# Altium footprint library LM51772RHAR.PcbLib: 3 footprints
Each footprint in its own frame and in the unit in brackets; x right, y up, seen from the top. Pads: shape width x height; smd on the part's side, far side on the other; paste and mask are expansions set on the pad; w line width, h text height; cw(c..) or ccw(c..) is an arc to the next point about the centre after c.
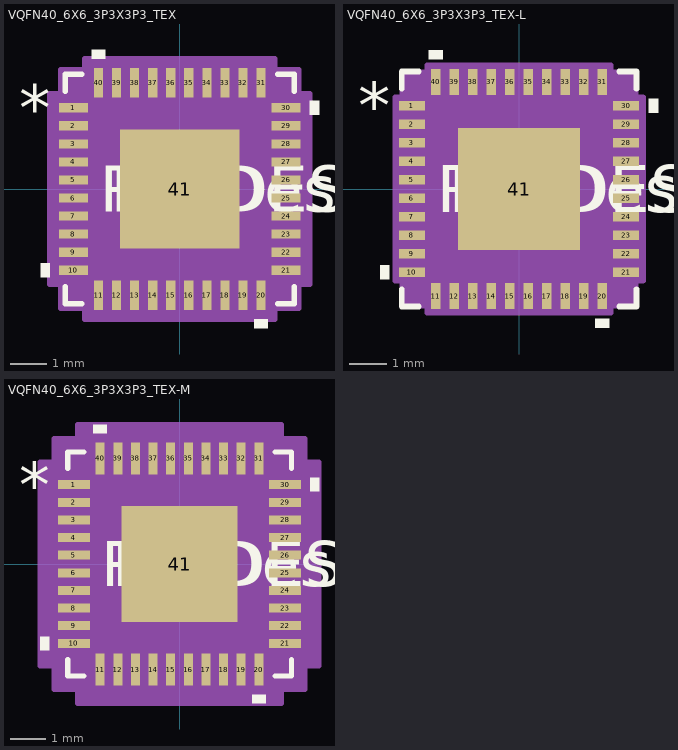
[diagram p0: the footprints below, top view; thin cyan lines are the x and y axes]

## VQFN40_6X6_3P3X3P3_TEX [mm]
pads (41):
  rect 0.808x0.255 smd paste+0 mask+0: 1(-2.944,2.25) 2(-2.944,1.75) 3(-2.944,1.25) 4(-2.944,0.75) 5(-2.944,0.25) 6(-2.944,-0.25) 7(-2.944,-0.75) 8(-2.944,-1.25) 9(-2.944,-1.75) 10(-2.944,-2.25) 21(2.944,-2.25) 22(2.944,-1.75) 23(2.944,-1.25) 24(2.944,-0.75) 25(2.944,-0.25) 26(2.944,0.25) 27(2.944,0.75) 28(2.944,1.25) 29(2.944,1.75) 30(2.944,2.25)
  rect 0.255x0.808 smd paste+0 mask+0: 11(-2.25,-2.944) 12(-1.75,-2.944) 13(-1.25,-2.944) 14(-0.75,-2.944) 15(-0.25,-2.944) 16(0.25,-2.944) 17(0.75,-2.944) 18(1.25,-2.944) 19(1.75,-2.944) 20(2.25,-2.944) 31(2.25,2.944) 32(1.75,2.944) 33(1.25,2.944) 34(0.75,2.944) 35(0.25,2.944) 36(-0.25,2.944) 37(-0.75,2.944) 38(-1.25,2.944) 39(-1.75,2.944) 40(-2.25,2.944)
  rect 3.302x3.302 smd paste+0 mask+0: 41(0,0)
Top Overlay:
  region: -3.602,-2.06 -3.856,-2.06 -3.856,-2.441 -3.602,-2.441
  region: 2.441,-3.602 2.06,-3.602 2.06,-3.856 2.441,-3.856
  region: 3.602,2.441 3.856,2.441 3.856,2.06 3.602,2.06
  region: -2.06,3.602 -2.441,3.602 -2.441,3.856 -2.06,3.856
  lines w0.152: -3.175,-2.71 -3.175,-3.175 -2.71,-3.175 ; -3.175,2.71 -3.175,3.175 -2.71,3.175 ; 2.71,-3.175 3.175,-3.175 3.175,-2.71 ; 2.71,3.175 3.175,3.175 3.175,2.71
  text "*" at -4.453,1.615 h1.27
  text "RefDes" at -1.905,-0.635 h1.27
  text "REFDES" at -2.222,-0.635 h1.27
Mechanical 13:
  drawing of 165 lines, arcs and shapes, not listed
  text "*" at -2.07,1.615 h1.27
  text "RefDes2" at -2.222,-0.635 h1.27
Mechanical 15:
  region: -2.631,-3.302 -3.302,-3.302 -3.302,-2.631 -3.602,-2.631 -3.602,2.631 -3.302,2.631 -3.302,3.302 -2.631,3.302 -2.631,3.602 2.631,3.602 2.631,3.302 3.302,3.302 3.302,2.631 3.602,2.631 3.602,-2.631 3.302,-2.631 3.302,-3.302 2.631,-3.302 2.631,-3.602 -2.631,-3.602
  lines w0.152: -3.602,-2.631 -3.302,-2.631 -3.302,-3.302 -2.631,-3.302 -2.631,-3.602 2.631,-3.602 2.631,-3.302 3.302,-3.302 3.302,-2.631 3.602,-2.631 3.602,2.631 3.302,2.631 3.302,3.302 2.631,3.302 2.631,3.602 -2.631,3.602 -2.631,3.302 -3.302,3.302 -3.302,2.631 -3.602,2.631 -3.602,-2.631
3D body "VQFN40_6X6_3P3X3P3_TEX.step": height 0.94, standoff 0, extent -3.048,-3.048 3.048,3.048

## VQFN40_6X6_3P3X3P3_TEX-L [mm]
pads (41):
  rect 0.708x0.255 smd paste+0 mask+0: 1(-2.894,2.25) 2(-2.894,1.75) 3(-2.894,1.25) 4(-2.894,0.75) 5(-2.894,0.25) 6(-2.894,-0.25) 7(-2.894,-0.75) 8(-2.894,-1.25) 9(-2.894,-1.75) 10(-2.894,-2.25) 21(2.894,-2.25) 22(2.894,-1.75) 23(2.894,-1.25) 24(2.894,-0.75) 25(2.894,-0.25) 26(2.894,0.25) 27(2.894,0.75) 28(2.894,1.25) 29(2.894,1.75) 30(2.894,2.25)
  rect 0.255x0.708 smd paste+0 mask+0: 11(-2.25,-2.894) 12(-1.75,-2.894) 13(-1.25,-2.894) 14(-0.75,-2.894) 15(-0.25,-2.894) 16(0.25,-2.894) 17(0.75,-2.894) 18(1.25,-2.894) 19(1.75,-2.894) 20(2.25,-2.894) 31(2.25,2.894) 32(1.75,2.894) 33(1.25,2.894) 34(0.75,2.894) 35(0.25,2.894) 36(-0.25,2.894) 37(-0.75,2.894) 38(-1.25,2.894) 39(-1.75,2.894) 40(-2.25,2.894)
  rect 3.302x3.302 smd paste+0 mask+0: 41(0,0)
Top Overlay:
  region: -3.502,-2.06 -3.756,-2.06 -3.756,-2.441 -3.502,-2.441
  region: 2.441,-3.502 2.06,-3.502 2.06,-3.756 2.441,-3.756
  region: 3.502,2.441 3.756,2.441 3.756,2.06 3.502,2.06
  region: -2.06,3.502 -2.441,3.502 -2.441,3.756 -2.06,3.756
  lines w0.152: -3.175,-2.71 -3.175,-3.175 -2.71,-3.175 ; -3.175,2.71 -3.175,3.175 -2.71,3.175 ; 2.71,-3.175 3.175,-3.175 3.175,-2.71 ; 2.71,3.175 3.175,3.175 3.175,2.71
  text "*" at -4.353,1.615 h1.27
  text "RefDes" at -1.905,-0.635 h1.27
  text "REFDES" at -2.222,-0.635 h1.27
Mechanical 13:
  drawing of 165 lines, arcs and shapes, not listed
  text "*" at -2.07,1.615 h1.27
  text "RefDes2" at -2.222,-0.635 h1.27
Mechanical 15:
  region: -2.479,-3.15 -3.15,-3.15 -3.15,-2.479 -3.35,-2.479 -3.35,2.479 -3.15,2.479 -3.15,3.15 -2.479,3.15 -2.479,3.35 2.479,3.35 2.479,3.15 3.15,3.15 3.15,2.479 3.35,2.479 3.35,-2.479 3.15,-2.479 3.15,-3.15 2.479,-3.15 2.479,-3.35 -2.479,-3.35
  lines w0.152: -3.35,-2.479 -3.15,-2.479 -3.15,-3.15 -2.479,-3.15 -2.479,-3.35 2.479,-3.35 2.479,-3.15 3.15,-3.15 3.15,-2.479 3.35,-2.479 3.35,2.479 3.15,2.479 3.15,3.15 2.479,3.15 2.479,3.35 -2.479,3.35 -2.479,3.15 -3.15,3.15 -3.15,2.479 -3.35,2.479 -3.35,-2.479
3D body "VQFN40_6X6_3P3X3P3_TEX.step": height 0.94, standoff 0, extent -3.048,-3.048 3.048,3.048

## VQFN40_6X6_3P3X3P3_TEX-M [mm]
pads (41):
  rect 0.908x0.255 smd paste+0 mask+0: 1(-2.994,2.25) 2(-2.994,1.75) 3(-2.994,1.25) 4(-2.994,0.75) 5(-2.994,0.25) 6(-2.994,-0.25) 7(-2.994,-0.75) 8(-2.994,-1.25) 9(-2.994,-1.75) 10(-2.994,-2.25) 21(2.994,-2.25) 22(2.994,-1.75) 23(2.994,-1.25) 24(2.994,-0.75) 25(2.994,-0.25) 26(2.994,0.25) 27(2.994,0.75) 28(2.994,1.25) 29(2.994,1.75) 30(2.994,2.25)
  rect 0.255x0.908 smd paste+0 mask+0: 11(-2.25,-2.994) 12(-1.75,-2.994) 13(-1.25,-2.994) 14(-0.75,-2.994) 15(-0.25,-2.994) 16(0.25,-2.994) 17(0.75,-2.994) 18(1.25,-2.994) 19(1.75,-2.994) 20(2.25,-2.994) 31(2.25,2.994) 32(1.75,2.994) 33(1.25,2.994) 34(0.75,2.994) 35(0.25,2.994) 36(-0.25,2.994) 37(-0.75,2.994) 38(-1.25,2.994) 39(-1.75,2.994) 40(-2.25,2.994)
  rect 3.302x3.302 smd paste+0 mask+0: 41(0,0)
Top Overlay:
  region: -3.702,-2.06 -3.956,-2.06 -3.956,-2.441 -3.702,-2.441
  region: 2.441,-3.702 2.06,-3.702 2.06,-3.956 2.441,-3.956
  region: 3.702,2.441 3.956,2.441 3.956,2.06 3.702,2.06
  region: -2.06,3.702 -2.441,3.702 -2.441,3.956 -2.06,3.956
  lines w0.152: -3.175,-2.71 -3.175,-3.175 -2.71,-3.175 ; -3.175,2.71 -3.175,3.175 -2.71,3.175 ; 2.71,-3.175 3.175,-3.175 3.175,-2.71 ; 2.71,3.175 3.175,3.175 3.175,2.71
  text "*" at -4.553,1.615 h1.27
  text "RefDes" at -1.905,-0.635 h1.27
  text "REFDES" at -2.222,-0.635 h1.27
Mechanical 13:
  drawing of 165 lines, arcs and shapes, not listed
  text "*" at -2.07,1.615 h1.27
  text "RefDes2" at -2.222,-0.635 h1.27
Mechanical 15:
  region: -2.885,-3.556 -3.556,-3.556 -3.556,-2.885 -3.956,-2.885 -3.956,2.885 -3.556,2.885 -3.556,3.556 -2.885,3.556 -2.885,3.956 2.885,3.956 2.885,3.556 3.556,3.556 3.556,2.885 3.956,2.885 3.956,-2.885 3.556,-2.885 3.556,-3.556 2.885,-3.556 2.885,-3.956 -2.885,-3.956
  lines w0.152: -3.956,-2.885 -3.556,-2.885 -3.556,-3.556 -2.885,-3.556 -2.885,-3.956 2.885,-3.956 2.885,-3.556 3.556,-3.556 3.556,-2.885 3.956,-2.885 3.956,2.885 3.556,2.885 3.556,3.556 2.885,3.556 2.885,3.956 -2.885,3.956 -2.885,3.556 -3.556,3.556 -3.556,2.885 -3.956,2.885 -3.956,-2.885
3D body "VQFN40_6X6_3P3X3P3_TEX.step": height 0.94, standoff 0, extent -3.048,-3.048 3.048,3.048